# Altium schematic symbol library MCU0805MD1002BP500.SchLib: 1 symbol
Pins are listed as number, name and electrical type; pins without a type are passive.

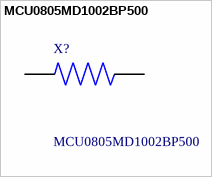
[diagram p0: symbol MCU0805MD1002BP500]

## MCU0805MD1002BP500
designator X?
Thin Film Resistors - SMD MCU 0805-25 0.1% AT P5 10K; Manufacturer_Name: Vishay; Geometry.Height: 0.62mm; Mouser Part Number: 594-MCU0805MD1002BP5; Mouser Price/Stock: https://www.mouser.co.uk/ProductDetail/Vishay-Beyschlag/MCU0805MD1002BP500?qs=rfsXwfL%252BOM%252BljhcDU131dA%3D%3D; Manufacturer_Part_Number: MCU0805MD1002BP500; Datasheet Link: *
footprint RESC2012X62N
pins: 1, 2